# Altium footprint library conn.PcbLib: 101 footprints (part 3 of 7)
Each footprint in its own frame and in the unit in brackets; x right, y up, seen from the top. Pads: shape width x height; smd on the part's side, far side on the other; paste and mask are expansions set on the pad; w line width, h text height; cw(c..) or ccw(c..) is an arc to the next point about the centre after c.
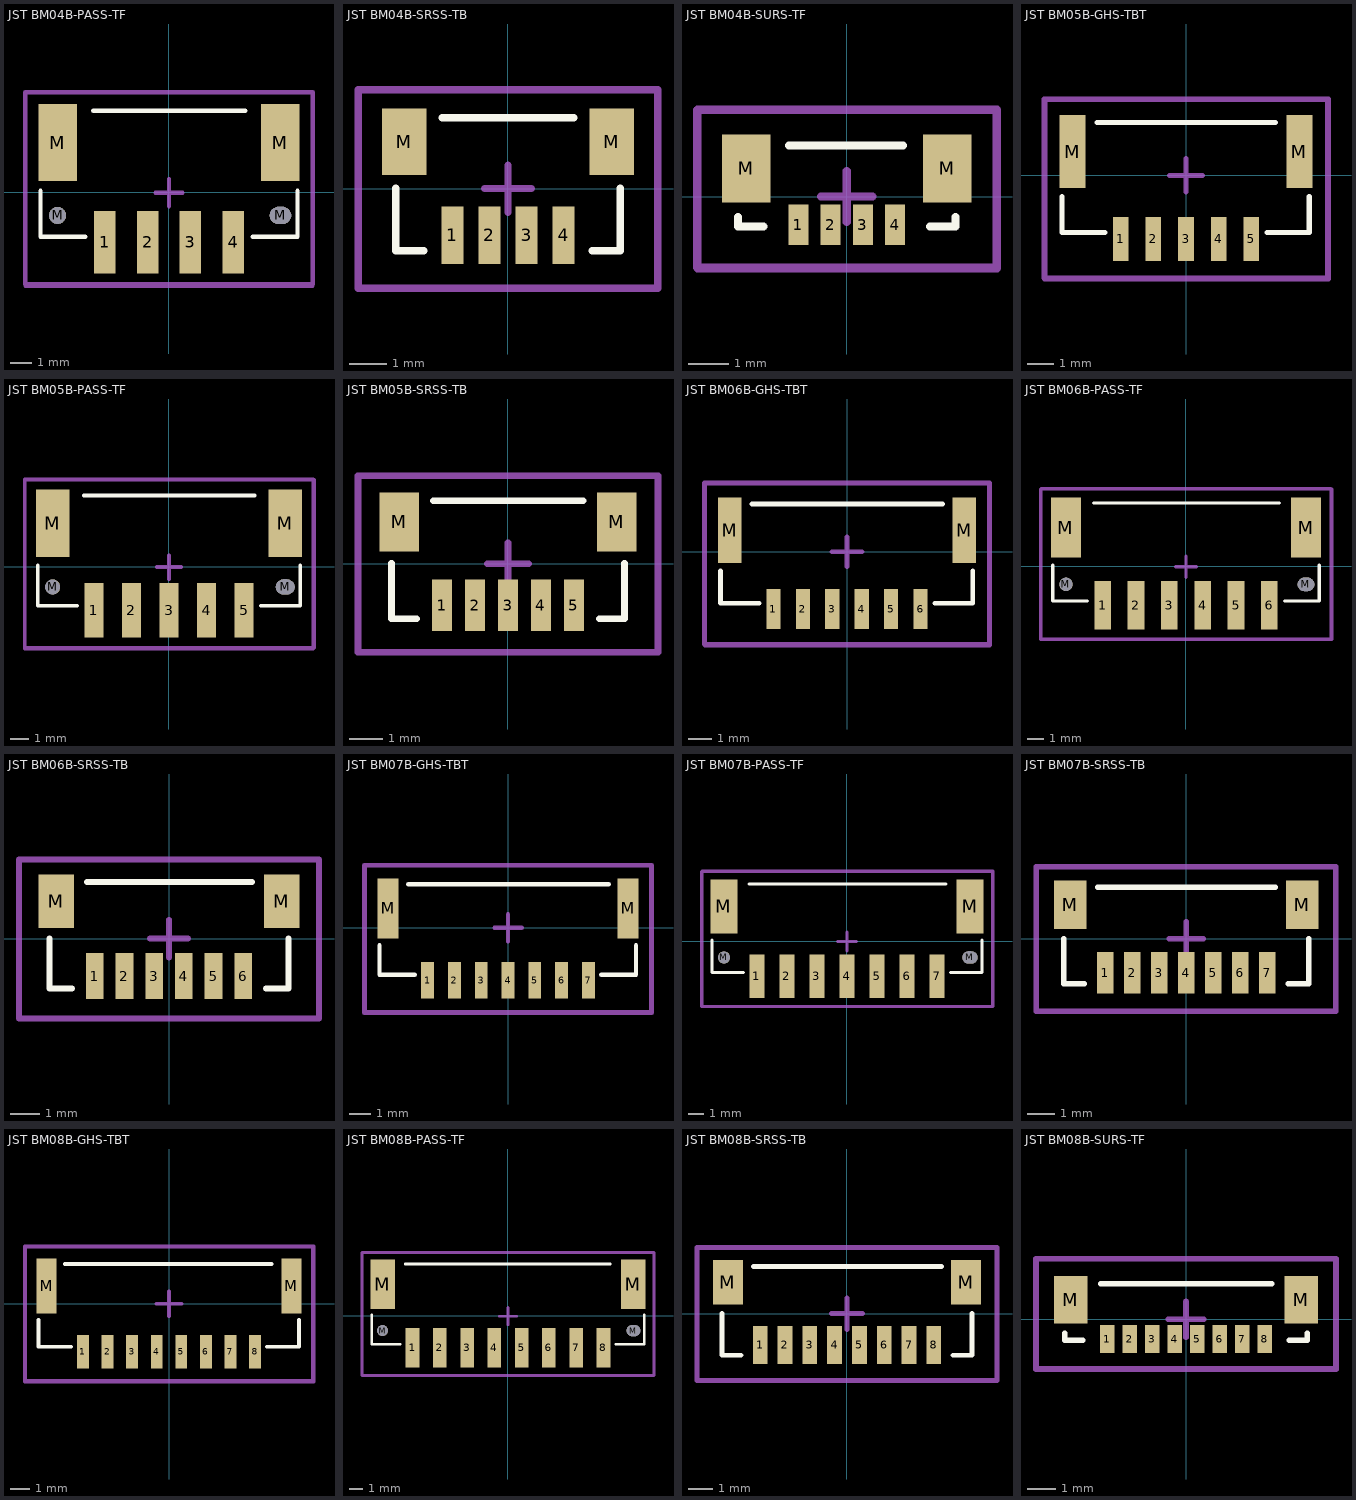
[diagram p2: the footprints below, top view; thin cyan lines are the x and y axes]

## JST BM04B-PASS-TF [mm] "JST PA Series 2mm pitch, top entry connector"
height 11.1
pads (8):
  rect 1x2.9 smd: 1(-3,-2.325) 2(-1,-2.325) 3(1,-2.325) 4(3,-2.325)
  round 0.8 hole 0.8 unplated mask+0.102: M(-5.2,-1.075)
  rect 1.8x3.6 smd: M(-5.2,2.325) M(5.2,2.325)
  oval 1x0.8 hole 0.8 slot 1 at 0 deg unplated mask+0.102: M(5.2,-1.075)
Top Overlay:
  lines w0.2: -6,0.075 -6,-2.075 -3.905,-2.075 ; -3.54,3.81 3.556,3.81 ; 3.905,-2.075 6,-2.075 6,0.075
Top Component:
  lines w0.203: -6.706,-4.293 -6.706,4.674 6.706,4.674 6.706,-4.293 -6.706,-4.293
  text ".Designator" at -0.813,-0.61 h2.03
Component Center:
  lines w0.2: -0.635,-0.015 0.635,-0.015 ; 0,-0.65 0,0.62 ; -6.699,-4.357 -6.699,4.66 6.699,4.66 6.699,-4.357 -6.699,-4.357
3D body "JST BM04B-PASS-TF.STEP": height 9, standoff 0, extent -6,-3.225 6,3.875

## JST BM04B-SRSS-TB [mm] "1.0mm pitch/Disconnectable Crimp style connector"
height 2.95
pads (6):
  rect 0.6x1.55 smd: 1(-1.5,-1.262) 2(-0.5,-1.262) 3(0.5,-1.262) 4(1.5,-1.262)
  rect 1.2x1.8 smd: M(-2.8,1.262) M(2.8,1.262)
Top Overlay:
  lines w0.2: -3.032,0.008 -3.032,-1.676 -2.27,-1.676 ; -1.77,1.905 1.778,1.905 ; 2.27,-1.676 3.032,-1.676 3.032,0.008
Top Component:
  lines w0.203: -4.039,-2.692 -4.039,2.667 4.039,2.667 4.039,-2.692 -4.039,-2.692
  text ".Designator" at -0.813,-0.559 h2.03
Component Center:
  lines w0.2: -0.635,0 0.635,0 ; 0,-0.635 0,0.635 ; -4.048,-2.692 4.048,-2.692 4.048,2.667 -4.048,2.667 -4.048,-2.692
3D body "JST BM04B-SRSS-TB.STEP": height 4.32, standoff 0, extent -3,-1.688 3,1.912

## JST BM04B-SURS-TF [mm] "1.0mm pitch/Disconnectable Crimp style connector"
height 3.95
pads (6):
  rect 0.5x1 smd: 1(-1.2,-0.7) 2(-0.4,-0.7) 3(0.4,-0.7) 4(1.2,-0.7)
  rect 1.2x1.7 smd: M(-2.5,0.7) M(2.5,0.7)
Top Overlay:
  lines w0.2: -2.705,-0.5 -2.705,-0.741 -2.07,-0.741 ; -1.435,1.27 1.397,1.27 ; 2.07,-0.741 2.705,-0.741 2.705,-0.5
Top Component:
  lines w0.203: -3.708,-1.778 -3.708,2.159 3.734,2.159 3.734,-1.778 -3.708,-1.778
  text ".Designator" at -0.813,-0.584 h2.03
Component Center:
  lines w0.2: -0.635,0 0.635,0 ; 0,-0.635 0,0.635 ; -3.721,-1.757 -3.721,2.159 3.721,2.159 3.721,-1.757 -3.721,-1.757
3D body "JST BM04B-SURS-TF.STEP": height 2.75, standoff 0, extent -2.7,-1.016 2.7,1.234

## JST BM05B-GHS-TBT [mm] "JST GH Series 1.25mm pitch, top entry connector"
height 4.5
pads (7):
  rect 0.6x1.7 smd: 1(-2.5,-2.437) 2(-1.25,-2.437) 3(0,-2.437) 4(1.25,-2.437) 5(2.5,-2.437)
  rect 1x2.8 smd: M(-4.35,0.913) M(4.35,0.913)
Top Overlay:
  lines w0.2: -4.75,-0.812 -4.75,-2.187 -3.1,-2.187 ; -3.409,2.032 3.429,2.032 ; 3.1,-2.187 4.725,-2.187 4.725,-0.812
Top Component:
  lines w0.203: -5.41,-3.962 5.461,-3.962 5.461,2.921 -5.41,2.921 -5.41,-3.962
  text ".Designator" at -0.813,-0.584 h2.03
Component Center:
  lines w0.2: -0.635,0 0.635,0 ; 0,-0.635 0,0.635 ; -5.431,-3.937 -5.431,2.921 5.431,2.921 5.431,-3.937 -5.431,-3.937
3D body "JST BM05B-GHS-TBT.STEP": height 4.18, standoff -0.03, extent -4.75,-2.918 4.75,2.032

## JST BM05B-PASS-TF [mm] "JST PA Series 2mm pitch, top entry connector"
height 11.1
pads (9):
  rect 1x2.9 smd: 1(-4,-2.325) 2(-2,-2.325) 3(0,-2.325) 4(2,-2.325) 5(4,-2.325)
  round 0.8 hole 0.8 unplated mask+0.102: M(-6.2,-1.075)
  rect 1.8x3.6 smd: M(-6.2,2.325) M(6.2,2.325)
  oval 1x0.8 hole 0.8 slot 1 at 0 deg unplated mask+0.102: M(6.2,-1.075)
Top Overlay:
  lines w0.2: -7,0.075 -7,-2.075 -4.905,-2.075 ; -4.54,3.81 4.572,3.81 ; 4.905,-2.075 7,-2.075 7,0.075
Top Component:
  lines w0.203: -7.696,-4.318 -7.696,4.648 7.747,4.648 7.747,-4.318 -7.696,-4.318
  text ".Designator" at -0.813,-0.584 h2.03
Component Center:
  lines w0.2: -0.635,-0.015 0.635,-0.015 ; 0,-0.65 0,0.62 ; -7.699,-4.357 -7.699,4.66 7.699,4.66 7.699,-4.357 -7.699,-4.357
3D body "JST BM05B-PASS-TF.STEP": height 9, standoff 0, extent -7,-3.225 7,3.875

## JST BM05B-SRSS-TB [mm] "1.0mm pitch/Disconnectable Crimp style connector"
height 2.95
pads (7):
  rect 0.6x1.55 smd: 1(-2,-1.262) 2(-1,-1.262) 3(0,-1.262) 4(1,-1.262) 5(2,-1.262)
  rect 1.2x1.8 smd: M(-3.3,1.262) M(3.3,1.262)
Top Overlay:
  lines w0.2: -3.532,0.008 -3.532,-1.676 -2.77,-1.676 ; -2.27,1.905 2.286,1.905 ; 2.77,-1.676 3.532,-1.676 3.532,0.008
Top Component:
  lines w0.203: -4.547,-2.692 4.547,-2.692 4.547,2.667 -4.547,2.667 -4.547,-2.692
  text ".Designator" at -0.813,-0.533 h2.03
Component Center:
  lines w0.2: -0.635,0 0.635,0 ; 0,-0.635 0,0.635 ; -4.548,-2.692 -4.548,2.667 4.548,2.667 4.548,-2.692 -4.548,-2.692
3D body "JST BM05B-SRSS-TB.STEP": height 4.32, standoff 0, extent -3.5,-1.688 3.5,1.912

## JST BM06B-GHS-TBT [mm] "JST GH Series 1.25mm pitch, top entry connector"
height 4.5
pads (8):
  rect 0.6x1.7 smd: 1(-3.125,-2.437) 2(-1.875,-2.437) 3(-0.625,-2.437) 4(0.625,-2.437) 5(1.875,-2.437) 6(3.125,-2.437)
  rect 1x2.8 smd: M(-4.975,0.913) M(4.975,0.913)
Top Overlay:
  lines w0.2: -5.375,-0.812 -5.375,-2.187 -3.725,-2.187 ; -4.034,2.032 4.064,2.032 ; 3.725,-2.187 5.35,-2.187 5.35,-0.812
Top Component:
  lines w0.203: -6.045,-3.962 6.071,-3.962 6.071,2.921 -6.045,2.921 -6.045,-3.962
  text ".Designator" at -0.813,-0.559 h2.03
Component Center:
  lines w0.2: -0.635,0 0.635,0 ; 0,-0.635 0,0.635 ; -6.056,-3.937 -6.056,2.921 6.056,2.921 6.056,-3.937 -6.056,-3.937
3D body "JST BM06B-GHS-TBT.STEP": height 4.18, standoff -0.03, extent -5.375,-2.918 5.375,2.032

## JST BM06B-PASS-TF [mm] "JST PA Series 2mm pitch, top entry connector"
height 11.1
pads (10):
  rect 1x2.9 smd: 1(-5,-2.325) 2(-3,-2.325) 3(-1,-2.325) 4(1,-2.325) 5(3,-2.325) 6(5,-2.325)
  round 0.8 hole 0.8 unplated mask+0.102: M(-7.2,-1.075)
  rect 1.8x3.6 smd: M(-7.2,2.325) M(7.2,2.325)
  oval 1x0.8 hole 0.8 slot 1 at 0 deg unplated mask+0.102: M(7.2,-1.075)
Top Overlay:
  lines w0.2: -8,0.075 -8,-2.075 -5.905,-2.075 ; -5.54,3.81 5.588,3.81 ; 5.905,-2.075 8,-2.075 8,0.075
Top Component:
  lines w0.203: -8.712,-4.369 -8.712,4.648 8.738,4.648 8.738,-4.369 -8.712,-4.369
  text ".Designator" at -0.813,-0.584 h2.03
Component Center:
  lines w0.2: -0.635,-0.015 0.635,-0.015 ; 0,-0.65 0,0.62 ; -8.699,-4.357 -8.699,4.66 8.699,4.66 8.699,-4.357 -8.699,-4.357
3D body "JST BM06B-PASS-TF.STEP": height 9, standoff 0, extent -8,-3.225 8,3.875

## JST BM06B-SRSS-TB [mm] "1.0mm pitch/Disconnectable Crimp style connector"
height 2.95
pads (8):
  rect 0.6x1.55 smd: 1(-2.5,-1.262) 2(-1.5,-1.262) 3(-0.5,-1.262) 4(0.5,-1.262) 5(1.5,-1.262) 6(2.5,-1.262)
  rect 1.2x1.8 smd: M(-3.8,1.262) M(3.8,1.262)
Top Overlay:
  lines w0.2: -4.032,0.008 -4.032,-1.676 -3.27,-1.676 ; -2.77,1.905 2.794,1.905 ; 3.27,-1.676 4.032,-1.676 4.032,0.008
Top Component:
  lines w0.203: -5.055,-2.692 -5.055,2.667 5.055,2.667 5.055,-2.692 -5.055,-2.692
  text ".Designator" at -0.813,-0.559 h2.03
Component Center:
  lines w0.2: -0.635,0 0.635,0 ; 0,-0.635 0,0.635 ; -5.048,-2.692 -5.048,2.667 5.048,2.667 5.048,-2.692 -5.048,-2.692
3D body "JST BM06B-SRSS-TB.STEP": height 4.32, standoff 0, extent -4,-1.688 4,1.912

## JST BM07B-GHS-TBT [mm] "JST GH Series 1.25mm pitch, top entry connector"
height 4.5
pads (9):
  rect 0.6x1.7 smd: 1(-3.75,-2.437) 2(-2.5,-2.437) 3(-1.25,-2.437) 4(0,-2.437) 5(1.25,-2.437) 6(2.5,-2.437) 7(3.75,-2.437)
  rect 1x2.8 smd: M(-5.6,0.913) M(5.6,0.913)
Top Overlay:
  lines w0.2: -6,-0.812 -6,-2.187 -4.35,-2.187 ; -4.659,2.032 4.699,2.032 ; 4.35,-2.187 5.975,-2.187 5.975,-0.812
Top Component:
  lines w0.203: -6.706,-3.962 -6.706,2.921 6.706,2.921 6.706,-3.962 -6.706,-3.962
  text ".Designator" at -0.813,-0.584 h2.03
Component Center:
  lines w0.2: -0.635,0 0.635,0 ; 0,-0.635 0,0.635 ; -6.681,-3.937 -6.681,2.921 6.681,2.921 6.681,-3.937 -6.681,-3.937
3D body "JST BM07B-GHS-TBT.STEP": height 4.18, standoff -0.03, extent -6,-2.918 6,2.032

## JST BM07B-PASS-TF [mm] "JST PA Series 2mm pitch, top entry connector"
height 11.1
pads (11):
  rect 1x2.9 smd: 1(-6,-2.325) 2(-4,-2.325) 3(-2,-2.325) 4(0,-2.325) 5(2,-2.325) 6(4,-2.325) 7(6,-2.325)
  round 0.8 hole 0.8 unplated mask+0.102: M(-8.2,-1.075)
  rect 1.8x3.6 smd: M(-8.2,2.325) M(8.2,2.325)
  oval 1x0.8 hole 0.8 slot 1 at 0 deg unplated mask+0.102: M(8.2,-1.075)
Top Overlay:
  lines w0.2: -9,0.075 -9,-2.075 -6.905,-2.075 ; -6.54,3.81 6.604,3.81 ; 6.905,-2.075 9,-2.075 9,0.075
Top Component:
  lines w0.203: -9.677,-4.343 -9.677,4.674 9.728,4.674 9.728,-4.343 -9.677,-4.343
  text ".Designator" at -1.778,-0.559 h2.03
Component Center:
  lines w0.2: -0.635,-0.015 0.635,-0.015 ; 0,-0.65 0,0.62 ; -9.699,-4.357 -9.699,4.66 9.699,4.66 9.699,-4.357 -9.699,-4.357
3D body "JST BM07B-PASS-TF.STEP": height 9, standoff 0, extent -9,-3.225 9,3.875

## JST BM07B-SRSS-TB [mm] "1.0mm pitch/Disconnectable Crimp style connector"
height 2.95
pads (9):
  rect 0.6x1.55 smd: 1(-3,-1.262) 2(-2,-1.262) 3(-1,-1.262) 4(0,-1.262) 5(1,-1.262) 6(2,-1.262) 7(3,-1.262)
  rect 1.2x1.8 smd: M(-4.3,1.262) M(4.3,1.262)
Top Overlay:
  lines w0.2: -4.532,0.008 -4.532,-1.676 -3.77,-1.676 ; -3.27,1.905 3.302,1.905 ; 3.77,-1.676 4.532,-1.676 4.532,0.008
Top Component:
  lines w0.203: -5.563,-2.692 -5.563,2.667 5.537,2.667 5.537,-2.692 -5.563,-2.692
  text ".Designator" at -0.813,-0.559 h2.03
Component Center:
  lines w0.2: -0.635,0 0.635,0 ; 0,-0.635 0,0.635 ; -5.548,-2.692 -5.548,2.667 5.548,2.667 5.548,-2.692 -5.548,-2.692
3D body "JST BM07B-SRSS-TB.STEP": height 4.32, standoff 0, extent -4.5,-1.688 4.5,1.912

## JST BM08B-GHS-TBT [mm] "JST GH Series 1.25mm pitch, top entry connector"
height 4.5
pads (10):
  rect 0.6x1.7 smd: 1(-4.375,-2.437) 2(-3.125,-2.437) 3(-1.875,-2.437) 4(-0.625,-2.437) 5(0.625,-2.437) 6(1.875,-2.437) 7(3.125,-2.437) 8(4.375,-2.437)
  rect 1x2.8 smd: M(-6.225,0.913) M(6.225,0.913)
Top Overlay:
  lines w0.2: -6.625,-0.812 -6.625,-2.187 -4.975,-2.187 ; -5.284,2.032 5.207,2.032 ; 4.975,-2.187 6.6,-2.187 6.6,-0.812
Top Component:
  lines w0.203: -7.315,-3.962 7.341,-3.962 7.341,2.921 -7.315,2.921 -7.315,-3.962
  text ".Designator" at -0.813,-0.559 h2.03
Component Center:
  lines w0.2: -0.635,0 0.635,0 ; 0,-0.635 0,0.635 ; -7.306,-3.937 -7.306,2.921 7.306,2.921 7.306,-3.937 -7.306,-3.937
3D body "JST BM08B-GHS-TBT.STEP": height 4.18, standoff -0.03, extent -6.625,-2.918 6.625,2.032

## JST BM08B-PASS-TF [mm] "JST PA Series 2mm pitch, top entry connector"
height 11.1
pads (12):
  rect 1x2.9 smd: 1(-7,-2.325) 2(-5,-2.325) 3(-3,-2.325) 4(-1,-2.325) 5(1,-2.325) 6(3,-2.325) 7(5,-2.325) 8(7,-2.325)
  round 0.8 hole 0.8 unplated mask+0.102: M(-9.2,-1.075)
  rect 1.8x3.6 smd: M(-9.2,2.325) M(9.2,2.325)
  oval 1x0.8 hole 0.8 slot 1 at 0 deg unplated mask+0.102: M(9.2,-1.075)
Top Overlay:
  lines w0.2: -10,0.075 -10,-2.075 -7.905,-2.075 ; -7.54,3.81 7.493,3.81 ; 7.905,-2.075 10,-2.075 10,0.075
Top Component:
  lines w0.203: -10.693,-4.369 10.693,-4.369 10.693,4.648 -10.693,4.648 -10.693,-4.369
  text ".Designator" at -0.813,-0.559 h2.03
Component Center:
  lines w0.2: -0.635,-0.015 0.635,-0.015 ; 0,-0.65 0,0.62 ; -10.699,-4.357 10.699,-4.357 10.699,4.66 -10.699,4.66 -10.699,-4.357
3D body "JST BM08B-PASS-TF.STEP": height 9, standoff 0, extent -10,-3.225 10,3.875

## JST BM08B-SRSS-TB [mm] "1.0mm pitch/Disconnectable Crimp style connector"
height 2.95
pads (10):
  rect 0.6x1.55 smd: 1(-3.5,-1.262) 2(-2.5,-1.262) 3(-1.5,-1.262) 4(-0.5,-1.262) 5(0.5,-1.262) 6(1.5,-1.262) 7(2.5,-1.262) 8(3.5,-1.262)
  rect 1.2x1.8 smd: M(-4.8,1.262) M(4.8,1.262)
Top Overlay:
  lines w0.2: -5.032,0.008 -5.032,-1.676 -4.27,-1.676 ; -3.77,1.905 3.81,1.905 ; 4.27,-1.676 5.032,-1.676 5.032,0.008
Top Component:
  lines w0.203: -6.045,-2.692 -6.045,2.667 6.045,2.667 6.045,-2.692 -6.045,-2.692
  text ".Designator" at -0.813,-0.559 h2.03
Component Center:
  lines w0.2: -0.635,0 0.635,0 ; 0,-0.635 0,0.635 ; -6.048,-2.692 -6.048,2.667 6.048,2.667 6.048,-2.692 -6.048,-2.692
3D body "JST BM08B-SRSS-TB.STEP": height 4.32, standoff 0, extent -5,-1.688 5,1.912

## JST BM08B-SURS-TF [mm] "1.0mm pitch/Disconnectable Crimp style connector"
height 3.95
pads (10):
  rect 0.5x1 smd: 1(-2.8,-0.7) 2(-2,-0.7) 3(-1.2,-0.7) 4(-0.4,-0.7) 5(0.4,-0.7) 6(1.2,-0.7) 7(2,-0.7) 8(2.8,-0.7)
  rect 1.2x1.7 smd: M(-4.1,0.7) M(4.1,0.7)
Top Overlay:
  lines w0.2: -4.305,-0.5 -4.305,-0.741 -3.67,-0.741 ; -3.035,1.27 3.048,1.27 ; 3.67,-0.741 4.305,-0.741 4.305,-0.5
Top Component:
  lines w0.203: -5.334,-1.778 -5.334,2.159 5.334,2.159 5.334,-1.778 -5.334,-1.778
  text ".Designator" at -0.813,-0.559 h2.03
Component Center:
  lines w0.2: -0.635,0 0.635,0 ; 0,-0.635 0,0.635 ; -5.321,-1.757 -5.321,2.159 5.321,2.159 5.321,-1.757 -5.321,-1.757
3D body "JST BM08B-SURS-TF.STEP": height 2.75, standoff 0, extent -4.3,-1.016 4.3,1.234